# Altium schematic symbol library Simulation Sources.SchLib: 14 symbols
Pins are listed as number, name and electrical type; pins without a type are passive.

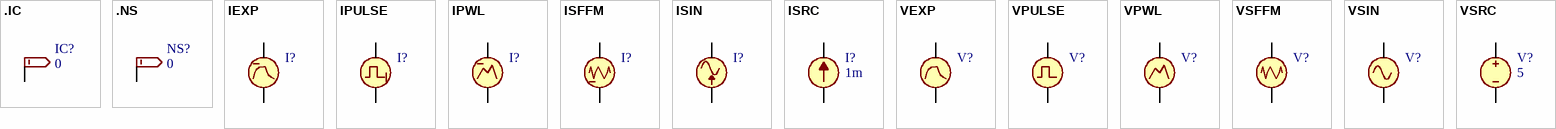
[diagram p0: symbols .IC to VSRC]

## .IC
designator IC?, comment 0
Initial Condition; Initial Voltage: 0
simulation model .IC (Initial Condition)
pins: 1

## .NS
designator NS?, comment 0
Initial Node Voltage Guess; Initial Voltage: 0
simulation model .NS (Initial Node Voltage Guess)
pins: 1

## IEXP
designator I?  (value not drawn)
Exponential Current Source
simulation model IEXP (Exponential Current Source)
pins: 1 +, 2 -

## IPULSE
designator I?  (value not drawn)
Pulse Current Source
simulation model IPULSE (Pulse Current Source)
pins: 1 +, 2 -

## IPWL
designator I?  (value not drawn)
Piecewise Linear Current Source
simulation model IPWL (Piecewise Linear Current Source)
pins: 1 +, 2 -

## ISFFM
designator I?  (value not drawn)
Single-Frequency FM Current Source
simulation model ISFFM (Single-Frequency FM Current Source)
pins: 1 +, 2 -

## ISIN
designator I?  (value not drawn)
Sinusoidal Current Source
simulation model ISIN (Sinusoidal Current Source)
pins: 1 +, 2 -

## ISRC
designator I?, comment 1m
Current Source; Value: 1m
simulation model ISRC (Current Source)
pins: 1 +, 2 -

## VEXP
designator V?  (value not drawn)
Exponential Voltage Source
simulation model VEXP (Exponential Voltage Source)
pins: 1 +, 2 -

## VPULSE
designator V?  (value not drawn)
Pulse Voltage Source
simulation model VPULSE (Pulse Voltage Source)
pins: 1 +, 2 -

## VPWL
designator V?  (value not drawn)
Piecewise Linear Voltage Source
simulation model VPWL (Piecewise Linear Voltage Source)
pins: 1 +, 2 -

## VSFFM
designator V?  (value not drawn)
Single-Frequency FM Voltage Source
simulation model VSFFM (Single-Frequency FM Voltage Source)
pins: 1 +, 2 -

## VSIN
designator V?  (value not drawn)
Sinusoidal Voltage Source
simulation model VSIN (Sinusoidal Voltage Source)
pins: 1 +, 2 -

## VSRC
designator V?, comment 5
Voltage Source; Value: 5
simulation model VSRC (Voltage Source)
pins: 1 +, 2 -